# Altium footprint library Device Footprints.PcbLib: 16 footprints
Each footprint in its own frame and in the unit in brackets; x right, y up, seen from the top. Pads: shape width x height; smd on the part's side, far side on the other; paste and mask are expansions set on the pad; w line width, h text height; cw(c..) or ccw(c..) is an arc to the next point about the centre after c.
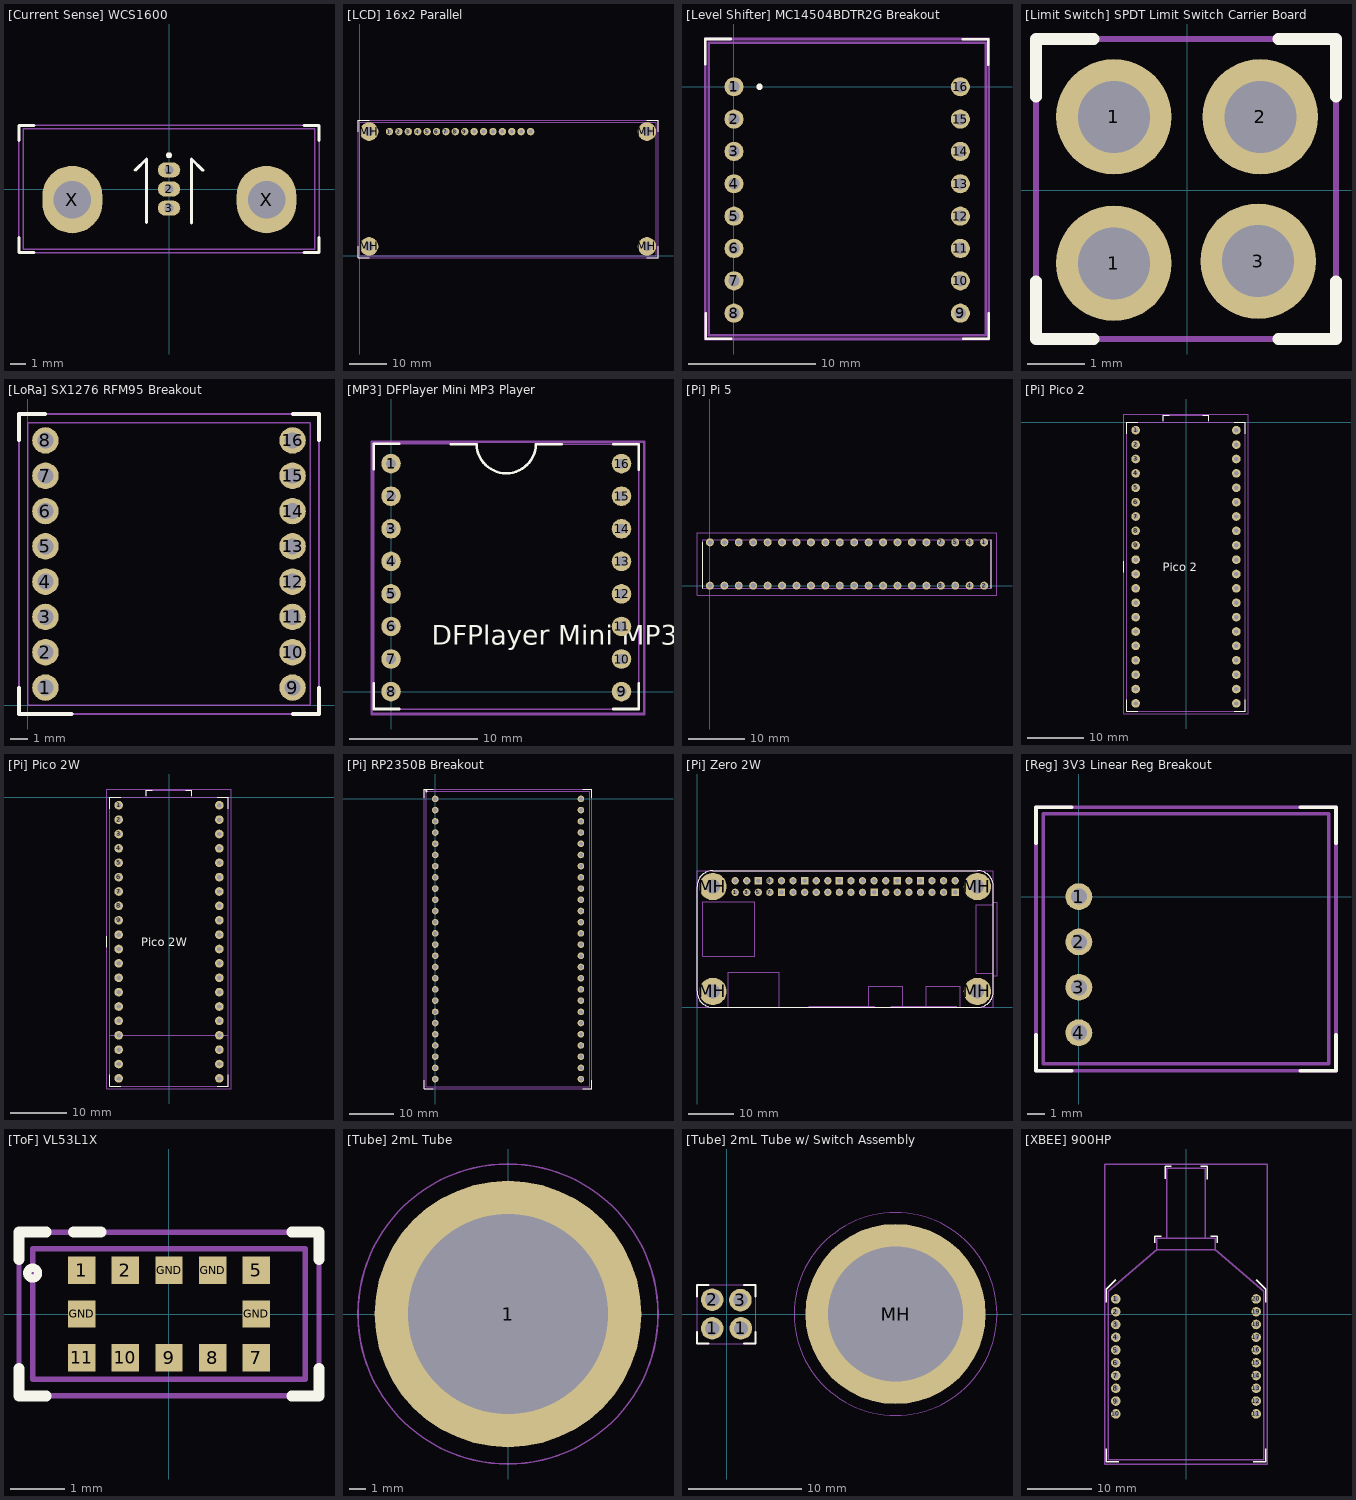
[diagram p0: the footprints below, top view; thin cyan lines are the x and y axes]

## [Current Sense] WCS1600 [mm]
height 1.75
pads (5):
  oval 1.5x1 hole 0.6: 1(0,1.27) 2(0,0) 3(0,-1.27)
  oval 4x4.5 hole 2.5: X(-6.442,-0.7) X(6.5,-0.7)
Top Overlay:
  circle w0.2: c0,2.25 r0.1
  lines w0.2: -10,-3.25 -10,-4.25 -9,-4.25 ; -10,3.25 -10,4.25 -9,4.25 ; -2.25,1.25 -1.5,2 -1.5,-2.25 ; 1.5,-2.25 1.5,2 2.25,1.25 ; 9,-4.25 10,-4.25 10,-3.25 ; 9,4.25 10,4.25 10,3.25
Physical Outline:
  lines w0.1: -9.7,-4 -9.7,4 9.7,4 9.7,-4 -9.7,-4
Part Border:
  lines w0.1: -10,-4.25 10,-4.25 10,4.25 -10,4.25 -10,-4.25
3D body "[Current Sense] WCS1600.step": height 20.45, standoff -11.2, extent -9.7,-4 9.7,4

## [LCD] 16x2 Parallel [mm]
pads (20):
  round 2 hole 1: 1(8,33.5) 2(10.54,33.5) 3(13.08,33.5) 4(15.62,33.5) 5(18.16,33.5) 6(20.7,33.5) 7(23.24,33.5) 8(25.78,33.5) 9(28.32,33.5) 10(30.86,33.5) 11(33.4,33.5) 12(35.94,33.5) 13(38.48,33.5) 14(41.02,33.5) 15(43.56,33.5) 16(46.1,33.5)
  round 5 hole 2.5: MH(2.5,2.5) MH(2.5,33.5) MH(77.5,2.5) MH(77.5,33.5)
Top Overlay:
  lines w0.2: -0.5,2.5 -0.5,-0.5 2.5,-0.5 ; -0.5,33.5 -0.5,36.5 2.5,36.5 ; 77.5,-0.5 80.5,-0.5 80.5,2.5 ; 77.5,36.5 80.5,36.5 80.5,33.5
Physical Outline:
  lines w0.2: 0,0 0,36 80,36 80,0 0,0
Part Border:
  lines w0.1: -0.5,-0.5 -0.5,36.5 80.5,36.5 80.5,-0.5 -0.5,-0.5
3D body "[LCD] 16x2 Parallel.stp": height 10.9, standoff 0.2, extent 0,0 80,36
3D body "Pin Header 1x16 TH Pitch 2.54mm.stp": height 9.5, standoff -3.2, extent 6.73,32.23 47.37,34.77

## [Level Shifter] MC14504BDTR2G Breakout [mm]
pads (16):
  round 1.5 hole 0.9: 1(0,0) 2(0,-2.54) 3(0,-5.08) 4(0,-7.62) 5(0,-10.16) 6(0,-12.7) 7(0,-15.24) 8(0,-17.78) 9(17.78,-17.78) 10(17.78,-15.24) 11(17.78,-12.7) 12(17.78,-10.16) 13(17.78,-7.62) 14(17.78,-5.08) 15(17.78,-2.54) 16(17.78,0)
Top Overlay:
  circle w0.3: c2,0 r0.1
  lines w0.2: -2.25,1.75 -2.25,3.75 -0.25,3.75 ; -2.234,-17.803 -2.234,-19.803 -0.234,-19.803 ; 17.984,3.743 19.984,3.743 19.984,1.743 ; 17.993,-19.794 19.993,-19.794 19.993,-17.794
Physical Outline:
  lines w0.2: -2,-19.53 19.78,-19.53 19.78,3.47 -2,3.47 -2,-19.53
Part Border:
  lines w0.2: -2.25,-19.81 20,-19.81 20,3.75 -2.25,3.75 -2.25,-19.81
3D body "Level Shifter Breakout.step": height 6.04, standoff -6.65, extent -2,-19.53 19.78,3.47

## [Limit Switch] SPDT Limit Switch Carrier Board [mm]
pads (4):
  round 2 hole 1.25: 1(-1.27,-1.27) 1(-1.27,1.27) 2(1.27,1.27) 3(1.23,-1.23)
Top Overlay:
  lines w0.2: -2.62,-1.58 -2.62,-2.58 -1.62,-2.58 ; -2.62,1.62 -2.62,2.62 -1.62,2.62 ; 1.58,-2.58 2.58,-2.58 2.58,-1.58 ; 1.58,2.62 2.58,2.62 2.58,1.62
Bottom Overlay:
  lines w0.2: -2.62,-1.58 -2.62,-2.58 -1.62,-2.58 ; -2.62,1.62 -2.62,2.62 -1.62,2.62 ; 1.58,-2.58 2.58,-2.58 2.58,-1.58 ; 1.58,2.62 2.58,2.62 2.58,1.62
Part Border:
  lines w0.1: -2.62,2.615 2.58,2.615 ; -2.62,-2.58 -2.62,2.62 2.58,2.62 2.58,-2.58 -2.62,-2.58
3D body "Limit Switch Carrier Board V1.step": height 5.93, standoff -24.75, extent -4.02,-14.301 3.98,6.051

## [LoRa] SX1276 RFM95 Breakout [mm]
pads (16):
  round 1.5 hole 0.9: 1(1,1) 2(1,3) 3(1,5) 4(1,7) 5(1,9) 6(1,11) 7(1,13) 8(1,15) 9(15,1) 10(15,3) 11(15,5) 12(15,7) 13(15,9) 14(15,11) 15(15,13) 16(15,15)
Top Overlay:
  lines w0.2: -0.5,1 -0.5,-0.5 2.5,-0.5 ; -0.5,15 -0.5,16.5 1,16.5 ; 15,-0.5 16.5,-0.5 16.5,1 ; 15,16.5 16.5,16.5 16.5,15
Physical Outline:
  lines w0.1: 0,0 16,0 16,16 0,16 0,0
Part Border:
  lines w0.1: -0.5,-0.5 -0.5,16.5 16.5,16.5 16.5,-0.5 -0.5,-0.5
3D body "[LoRa] SX1276 RFM95 Breakout.step": height 4.04, standoff 2, extent 0,0 16,16
3D body "[Header] 2.00mm 1x8 Male.STEP": height 4.8, standoff -3.6, extent 0,0 2,16
3D body "[Header] 2.00mm 1x8 Male.STEP": height 4.8, standoff -3.6, extent 14,0 16,16

## [MP3] DFPlayer Mini MP3 Player [mil]
pads (16):
  round 60 hole 30: 1(0,700) 2(0,600) 3(0,500) 4(0,400) 5(0,300) 6(0,200) 7(0,100) 8(0,0) 9(707.87,0) 10(707.87,100) 11(707.87,200) 12(707.87,300) 13(707.87,400) 14(707.87,500) 15(707.87,600) 16(707.87,700)
Top Overlay:
  lines w7.87: -53.54,25.2 -53.54,-53.54 25.2,-53.54 ; -53.54,682.68 -53.54,761.42 25.2,761.42 ; 184.13,760.04 262.87,760.04 ccw(c353.94,761.42) 445,760.2 523.74,760.2 ; 682.68,-53.54 761.42,-53.54 761.42,25.2 ; 682.68,760.2 761.42,760.2 761.42,681.46
  text "DFPlayer Mini MP3 Player" at 125.66,144.14 h59.06
Physical Outline:
  lines w3.94: 261.5,761.42 -53.54,761.42 -53.54,-53.54 761.42,-53.54 761.42,760.2 ; 262.87,760.04 ccw(c353.94,761.42) 445,760.2 760.2,760.2
Part Border:
  lines w7.87: -59.06,-68.9 -59.06,767.72 777.56,767.72 777.56,-68.9 -59.06,-68.9
3D body "DFPlayer Mini.step": height 236.22, standoff -204.72, extent -51.18,-163.78 767.72,759.84

## [Pi] Pi 5 [mm]
pads (40):
  round 1.4 hole 0.9: 1(48.26,7.62) 2(48.26,0) 3(45.72,7.62) 4(45.72,0) 5(43.18,7.62) 7(40.64,7.62) 8(40.64,0) 10(38.1,0) 11(35.56,7.62) 12(35.56,0) 13(33.02,7.62) 15(30.48,7.62) 16(30.48,0) 17(27.94,7.62) 18(27.94,0) 19(25.4,7.62) 20(25.4,0) 21(22.86,7.62) 22(22.86,0) 23(20.32,7.62) 24(20.32,0) 26(17.78,0) 27(15.24,7.62) 28(15.24,0) 29(12.7,7.62) 31(10.16,7.62) 32(10.16,0) 33(7.62,7.62) 35(5.08,7.62) 36(5.08,0) 37(2.54,7.62) 38(2.54,0) 40(0,0) GND(0,7.62) GND(7.62,0) GND(12.7,0) GND(17.78,7.62) GND(33.02,0) GND(38.1,7.62) GND(43.18,0)
Top Overlay:
  lines w0.1: -1.27,-0.44 -1.27,7.62 ; 49.53,-0.44 49.53,8.06
Physical Outline:
  lines w0.2: -1.27,-0.44 -1.27,8.06 49.53,8.06 49.53,-0.44 -1.27,-0.44
Part Border:
  lines w0.1: -2.27,-1.7 -2.27,9.32 50.53,9.32 50.53,-1.7 -2.27,-1.7
3D body "90152-2140.stp": height 6.02, standoff -2.87, extent -1.27,-0.44 49.53,8.06
3D body "RP5.STEP": height 56.94, standoff -0.25, extent -32.39,-7.993 56.65,12.648
3D body "Active Cooler.STEP": height 49.7, standoff 6.19, extent -8.351,-3.363 56.404,10.854

## [Pi] Pico 2 [mil]
pads (40):
  round 60 hole 30: 1(-350,-53.94) 2(-350,-153.94) 3(-350,-253.94) 4(-350,-353.94) 5(-350,-453.94) 6(-350,-553.94) 7(-350,-653.94) 8(-350,-753.94) 9(-350,-853.94) 10(-350,-953.94) 11(-350,-1053.94) 12(-350,-1153.94) 13(-350,-1253.94) 14(-350,-1353.94) 15(-350,-1453.94) 16(-350,-1553.94) 17(-350,-1653.94) 18(-350,-1753.94) 19(-350,-1853.94) 20(-350,-1953.94) 21(350,-1953.94) 22(350,-1853.94) 23(350,-1753.94) 24(350,-1653.94) 25(350,-1553.94) 26(350,-1453.94) 27(350,-1353.94) 28(350,-1253.94) 29(350,-1153.94) 30(350,-1053.94) 31(350,-953.94) 32(350,-853.94) 33(350,-753.94) 34(350,-653.94) 35(350,-553.94) 36(350,-453.94) 37(350,-353.94) 38(350,-253.94) 39(350,-153.94) 40(350,-53.94)
Top Overlay:
  lines w7.87: -433.07,-1043.31 -433.07,-964.57 ; -413.39,-1929.13 -413.39,-2007.87 -334.65,-2007.87 ; -413.39,-78.74 -413.39,0 -334.65,0 ; -157.48,11.81 -157.48,51.18 -118.11,51.18 ; 118.11,51.18 157.48,51.18 157.48,11.81 ; 334.65,-2007.87 413.39,-2007.87 413.39,-1929.13 ; 334.65,0 413.39,0 413.39,-78.74
  text "Pico 2" at -162.35,-1033.45 h59.06
Physical Outline:
  lines w7.87: -157.48,0 -157.48,51.18 157.48,51.18 157.48,0 ; -413.39,-2007.87 413.39,-2007.87 413.39,0 -413.39,0 -413.39,-2007.87
Part Border:
  lines w7.87: -433.07,-2027.56 -433.07,59.06 433.07,59.06 433.07,-2027.56 -433.07,-2027.56
3D body "Pin Header 1x10 TH Pitch 2.54mm.stp": height 240.16, standoff -259.67, extent -400,-2003.93 -300,-1003.93
3D body "Pin Header 1x10 TH Pitch 2.54mm.stp": height 240.16, standoff -259.67, extent -400,-1003.93 -300,-3.93
3D body "Pin Header 1x10 TH Pitch 2.54mm.stp": height 240.16, standoff -259.67, extent 300,-2003.93 400,-1003.93
3D body "Pin Header 1x10 TH Pitch 2.54mm.stp": height 240.16, standoff -259.67, extent 300,-1003.93 400,-3.93
3D body "Pico 2 Full Model.step": height 287.35, standoff 118.11, extent -413.39,-2007.87 413.39,43.39

## [Pi] Pico 2W [mil]
pads (40):
  round 60 hole 30: 1(-350,-53.94) 2(-350,-153.94) 3(-350,-253.94) 4(-350,-353.94) 5(-350,-453.94) 6(-350,-553.94) 7(-350,-653.94) 8(-350,-753.94) 9(-350,-853.94) 10(-350,-953.94) 11(-350,-1053.94) 12(-350,-1153.94) 13(-350,-1253.94) 14(-350,-1353.94) 15(-350,-1453.94) 16(-350,-1553.94) 17(-350,-1653.94) 18(-350,-1753.94) 19(-350,-1853.94) 20(-350,-1953.94) 21(350,-1953.94) 22(350,-1853.94) 23(350,-1753.94) 24(350,-1653.94) 25(350,-1553.94) 26(350,-1453.94) 27(350,-1353.94) 28(350,-1253.94) 29(350,-1153.94) 30(350,-1053.94) 31(350,-953.94) 32(350,-853.94) 33(350,-753.94) 34(350,-653.94) 35(350,-553.94) 36(350,-453.94) 37(350,-353.94) 38(350,-253.94) 39(350,-153.94) 40(350,-53.94)
Top Overlay:
  lines w7.87: -433.07,-1043.31 -433.07,-964.57 ; -413.39,-1929.13 -413.39,-2007.87 -334.65,-2007.87 ; -413.39,-78.74 -413.39,0 -334.65,0 ; -157.48,11.81 -157.48,51.18 -118.11,51.18 ; 118.11,51.18 157.48,51.18 157.48,11.81 ; 334.65,-2007.87 413.39,-2007.87 413.39,-1929.13 ; 334.65,0 413.39,0 413.39,-78.74
  text "Pico 2W" at -191.87,-1033.45 h59.06
Physical Outline:
  lines w7.87: -413.39,-1653.94 413.39,-1653.94 ; -157.48,0 -157.48,51.18 157.48,51.18 157.48,0 ; -413.39,-2007.87 413.39,-2007.87 413.39,0 -413.39,0 -413.39,-2007.87
Part Border:
  lines w7.87: -433.07,-2027.56 433.07,-2027.56 433.07,59.06 -433.07,59.06 -433.07,-2027.56
3D body "Pin Header 1x10 TH Pitch 2.54mm.stp": height 240.16, standoff -259.67, extent 300,-1003.93 400,-3.93
3D body "Pin Header 1x10 TH Pitch 2.54mm.stp": height 240.16, standoff -259.67, extent 300,-2003.93 400,-1003.93
3D body "Pin Header 1x10 TH Pitch 2.54mm.stp": height 240.16, standoff -259.67, extent -400,-1003.93 -300,-3.93
3D body "[Device] RP Pico 2W.step": height 257.67, standoff 112.47, extent -413.39,-2005.71 413.39,55.12
3D body "Pin Header 1x10 TH Pitch 2.54mm.stp": height 240.16, standoff -259.67, extent -400,-2003.93 -300,-1003.93

## [Pi] RP2350B Breakout [mm]
pads (52):
  round 1.5 hole 0.9: 1(0,0) 2(0,-2.54) 3(0,-5.08) 4(0,-7.62) 5(0,-10.16) 6(0,-12.7) 7(0,-15.24) 8(0,-17.78) 9(0,-20.32) 10(0,-22.86) 11(0,-25.4) 12(0,-27.94) 13(0,-30.48) 14(0,-33.02) 15(0,-35.56) 16(0,-38.1) 17(0,-40.64) 18(0,-43.18) 19(0,-45.72) 20(0,-48.26) 21(0,-50.8) 22(0,-53.34) 23(0,-55.88) 24(0,-58.42) 25(0,-60.96) 26(0,-63.5) 27(33.02,-63.5) 28(33.02,-60.96) 29(33.02,-58.42) 30(33.02,-55.88) 31(33.02,-53.34) 32(33.02,-50.8) 33(33.02,-48.26) 34(33.02,-45.72) 35(33.02,-43.18) 36(33.02,-40.64) 37(33.02,-38.1) 38(33.02,-35.56) 39(33.02,-33.02) 40(33.02,-30.48) 41(33.02,-27.94) 42(33.02,-25.4) 43(33.02,-22.86) 44(33.02,-20.32) 45(33.02,-17.78) 46(33.02,-15.24) 47(33.02,-12.7) 48(33.02,-10.16) 49(33.02,-7.62) 50(33.02,-5.08) 51(33.02,-2.54) 52(33.02,0)
Top Overlay:
  circle w0.3: c-2,1.75 r0.1
  lines w0.2: -2.5,-63.75 -2.5,-65.75 -0.5,-65.75 ; -2.5,0.25 -2.5,2.25 -0.5,2.25 ; 33.5,-65.75 35.5,-65.75 35.5,-63.75 ; 33.5,2.25 35.5,2.25 35.5,0.25
Physical Outline:
  lines w0.2: -2,-65.25 35,-65.25 35,1.75 -2,1.75 -2,-65.25
Part Border:
  lines w0.2: -2.5,-65.75 -2.5,2.25 35.5,2.25 35.5,-65.75 -2.5,-65.75
3D body "RP2350B_Breakout_Board_V0.step": height 15.2, standoff -6.61, extent -2,-65.25 35,1.75

## [Pi] Zero 2W [mm]
pads (44):
  round 1.6 hole 1: 1(8.37,25.23) 3(10.91,25.23) 5(13.45,25.23) 7(15.99,25.23) 8(15.99,27.77) 10(18.53,27.77) 11(21.07,25.23) 12(21.07,27.77) 13(23.61,25.23) 15(26.15,25.23) 16(26.15,27.77) 17(28.69,25.23) 18(28.69,27.77) 19(31.23,25.23) 21(33.77,25.23) 22(33.77,27.77) 23(36.31,25.23) 24(36.31,27.77) 26(38.85,27.77) 27(41.39,25.23) 28(41.39,27.77) 29(43.93,25.23) 31(46.47,25.23) 32(46.47,27.77) 33(49.01,25.23) 35(51.55,25.23) 36(51.55,27.77) 37(54.09,25.23) 38(54.09,27.77) 40(56.63,27.77) +5V(8.37,27.77) +5V(10.91,27.77)
  rect 1.6x1.6 hole 1: GND(13.45,27.77) GND(18.53,25.23) GND(23.61,27.77) GND(31.23,27.77) GND(38.85,25.23) GND(43.93,27.77) GND(49.01,27.77) GND(56.63,25.23)
  round 6 hole 3: MH(3.5,3.5) MH(3.5,26.5) MH(61.5,3.5) MH(61.5,26.5)
Top Overlay:
  lines w0.2: 0,3.5 ccw(c3.5,3.5) 3.5,0 61.5,0 ccw(c61.5,3.5) 65,3.5 65,26.5 ccw(c61.5,26.5) 61.5,30 3.5,30 ccw(c3.5,26.5) 0,26.5 0,3.5
Physical Outline:
  lines w0.1: 0,3.5 ccw(c3.5,3.5) 3.5,0 ; 0,26.5 cw(c3.5,26.5) 3.5,30 ; 6.8,0 6.8,7.7 18,7.7 18,0 ; 24.47,0.25 38.97,0.25 ; 37.65,0 37.65,4.67 45.15,4.67 45.15,0 ; 42.49,0.25 56.99,0.25 ; 50.25,0 50.25,4.67 57.75,4.67 57.75,0 ; 61.5,0 ccw(c61.5,3.5) 65,3.5 ; 61.5,30 cw(c61.5,26.5) 65,26.5 ; 65,6.9 65.8,6.9 65.8,23.1 65,23.1 ; 65,7.5 61.25,7.5 61.25,22.5 65,22.5 ; 0,0 0,30 65,30 65,0 0,0 ; 1.3,11.17 12.7,11.17 12.7,23.12 1.3,23.12 1.3,11.17
Part Border:
  lines w0.05: 23.71,0 39.73,0 ; 41.73,0 57.75,0
  lines w0.1: 0,0 65,0 65,30 0,30 0,0
3D body "RP 2W Standoff - 9mm Standoff.step": height 9, standoff 0, extent 0.506,23.503 6.494,29.497
3D body "RP 2W Standoff - 9mm Standoff.step": height 9, standoff 0, extent 0.512,0.503 6.5,6.497
3D body "Pin Header 1x10 TH Pitch 2.54mm.stp": height 11.2, standoff -1.5, extent 32.5,26.5 57.9,29.04
3D body "Raspberry Pi Zero 2 W.STEP": height 13.25, standoff 8.2, extent 0,-0.576 65.8,30
3D body "Pin Header 1x10 TH Pitch 2.54mm.stp": height 11.2, standoff -1.5, extent 7.1,23.96 32.5,26.5
3D body "Pin Header 1x10 TH Pitch 2.54mm.stp": height 11.2, standoff -1.5, extent 32.5,23.96 57.9,26.5
3D body "Pin Header 1x10 TH Pitch 2.54mm.stp": height 11.2, standoff -1.5, extent 7.1,26.5 32.5,29.04
3D body "20-Pin Header - Female - 2.54mm.step": height 5, standoff -3, extent 6.88,23.96 58.18,26.46
3D body "20-Pin Header - Female - 2.54mm.step": height 5, standoff -3, extent 6.88,26.46 58.18,28.96
3D body "RP 2W Standoff - 9mm Standoff.step": height 9, standoff 0, extent 58.512,23.503 64.5,29.497
3D body "RP 2W Standoff - 9mm Standoff.step": height 9, standoff 0, extent 58.506,0.503 64.494,6.497

## [Reg] 3V3 Linear Reg Breakout [mm]
pads (4):
  round 1.5 hole 0.9: 1(0,0) 2(0,-2.54) 3(0,-5.08) 4(0,-7.62)
Top Overlay:
  lines w0.2: -2.4,-7.75 -2.4,-9.75 -0.4,-9.75 ; -2.4,3 -2.4,5 -0.4,5 ; 12.4,-9.75 14.4,-9.75 14.4,-7.75 ; 12.4,5 14.4,5 14.4,3
Physical Outline:
  lines w0.2: -2,-9.37 -2,4.63 14,4.63 14,-9.37 -2,-9.37
Part Border:
  lines w0.2: -2.4,-9.75 -2.4,5 14.4,5 14.4,-9.75 -2.4,-9.75
3D body "3V3 Reg Breakout.step": height 6.29, standoff -6.41, extent -2,-9.37 14,4.63

## [ToF] VL53L1X [mm] "VL53L1CXV0FY/1"
pads (12):
  rect 0.5x0.5 smd: 1(-1.6,0.8) 2(-0.8,0.8) 5(1.6,0.8) 7(1.6,-0.8) 8(0.8,-0.8) 9(0,-0.8) 10(-0.8,-0.8) 11(-1.6,-0.8) GND(-1.6,0) GND(0,0.8) GND(0.8,0.8) GND(1.6,0)
Top Overlay:
  circle w0.15: c-2.5,0.75 r0.1
  lines w0.2: -2.75,-1 -2.75,-1.5 -2.25,-1.5 ; -2.75,1 -2.75,1.5 -2.25,1.5 ; -1.75,1.5 -1.25,1.5 ; 2.25,-1.5 2.75,-1.5 2.75,-1 ; 2.25,1.5 2.75,1.5 2.75,1
Physical Outline:
  lines w0.1: -2.5,-1.2 -2.5,1.2 2.5,1.2 2.5,-1.2 -2.5,-1.2
Part Border:
  lines w0.1: -2.75,-1.5 -2.75,1.5 2.75,1.5 2.75,-1.5 -2.75,-1.5
3D body "step_temp.STEP": height 1.6, standoff 0, extent -2.45,-1.25 2.45,1.25

## [Tube] 2mL Tube [mm]
pads (1):
  round 16 hole 12: 1(0,0)
Part Border:
  circle w0.1: c0,0 r9
3D body "[Tube] 2mL.step": height 13, standoff -32.15, extent -6.478,-6.5 6.478,6.5

## [Tube] 2mL Tube w/ Switch Assembly [mm]
pads (5):
  round 2 hole 1.25: 1(-1.27,-1.27) 1(1.27,-1.27) 2(-1.27,1.27) 3(1.23,1.23)
  round 16 hole 12: MH(15,0)
Top Overlay:
  lines w0.2: -2.62,-1.62 -2.62,-2.62 -1.62,-2.62 ; -2.62,1.58 -2.62,2.58 -1.62,2.58 ; 1.58,-2.62 2.58,-2.62 2.58,-1.62 ; 1.58,2.58 2.58,2.58 2.58,1.58
Bottom Overlay:
  lines w0.2: -2.62,-1.62 -2.62,-2.62 -1.62,-2.62 ; -2.62,1.58 -2.62,2.58 -1.62,2.58 ; 1.58,-2.62 2.58,-2.62 2.58,-1.62 ; 1.58,2.58 2.58,2.58 2.58,1.58
Part Border:
  circle w0.1: c15,0 r9
  lines w0.1: -2.615,-2.62 -2.615,2.58 ; -2.62,-2.62 -2.62,2.58 2.58,2.58 2.58,-2.62 -2.62,-2.62
3D body "[Tube] 2mL.step": height 13, standoff -32.15, extent 8.522,-6.5 21.478,6.5
3D body "Limit Switch Carrier Board V1.step": height 5.93, standoff -24.75, extent -6.051,-4.02 14.301,3.98

## [XBEE] 900HP [mm]
pads (21):
  round 1.5 hole 0.9: 1(-11,2.36) 2(-11,0.36) 3(-11,-1.64) 4(-11,-3.64) 5(-11,-5.64) 6(-11,-7.64) 7(-11,-9.64) 8(-11,-11.64) 9(-11,-13.64) 10(-11,-15.64) 11(11,-15.64) 12(11,-13.64) 13(11,-11.64) 14(11,-9.64) 15(11,-7.64) 16(11,-5.64) 17(11,-3.64) 18(11,-1.64) 19(11,0.36) 20(11,2.36)
  round 1.11 hole 0.71: !+10(11,-15.64)
Top Overlay:
  lines w0.2: -12.5,-21.15 -12.5,-23.15 -10.5,-23.15 ; -12.5,1.84 -12.5,3.84 -10.984,5.4 ; -4.89,11.17 -4.89,12.17 -3.89,12.17 ; -3.29,21.17 -3.29,23.17 -2.29,23.17 ; 2.31,23.15 3.31,23.15 3.31,21.15 ; 3.89,12.17 4.89,12.17 4.89,11.17 ; 10.5,-23.15 12.5,-23.15 12.5,-21.15 ; 10.984,5.4 12.5,3.84 12.5,1.84
Physical Outline:
  lines w0.2: -3,11.86 -3,22.86 3,22.86 3,11.86 ; -4.6,10.08 -4.6,11.86 4.6,11.86 4.6,10.08 ; -4.6,10.08 4.6,10.08 ; -4.6,10.08 -12.19,3.55 -12.19,-22.86 12.19,-22.86 12.19,3.55 4.6,10.08
Part Border:
  lines w0.2: -12.75,-23.5 -12.75,23.5 12.75,23.5 12.75,-23.5 -12.75,-23.5
3D body "XBP9B-DMSTB002.stp": height 12.17, standoff 0.44, extent -12.192,-22.862 12.192,22.782
3D body "[Header] 2.00mm 1x10 Male.stp": height 4.4, standoff -2.1, extent -12.2,-16.64 -9.8,3.36